# Altium schematic symbol library Library_Mecatronica.SchLib: 18 symbols
Pins are listed as number, name and electrical type; pins without a type are passive.

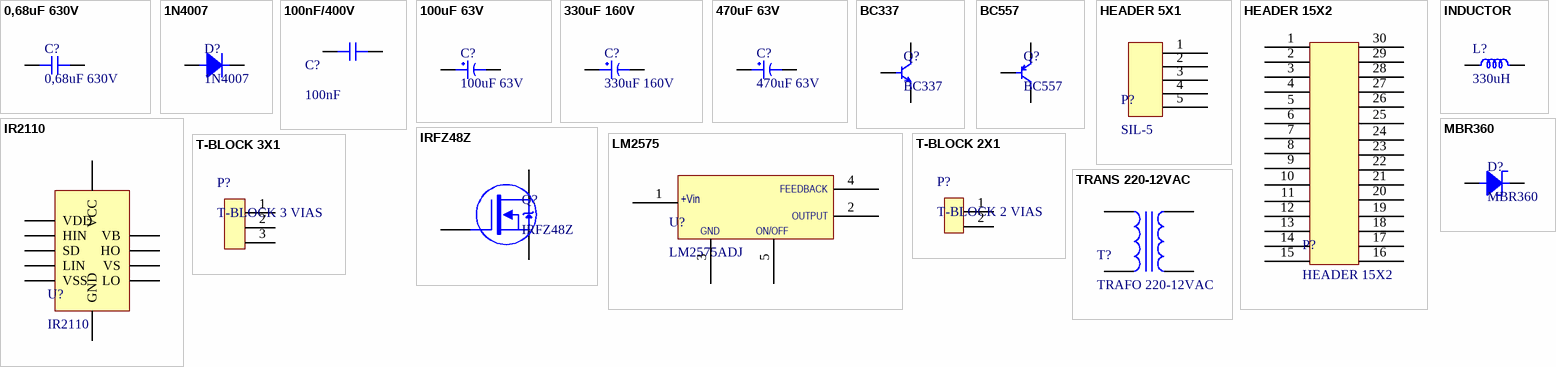
[diagram p0: symbols 0,68uF 630V to TRANS 220-12VAC]

## 0,68uF 630V
designator C?
POLYESTER CAPACITOR 0,68uF 630V
footprint 0,68uF 630V
pins: 1, 2

## 1N4007
designator D?
RECTIFIER DIODE 1A/700V
footprint 1N4007 (RECTIFIER DIODE 700V/1A)
pins: A, K

## 100nF/400V
designator C?, comment 100nF
POLYESTER CAPACITOR 100nF/400V
footprint CAPACITOR (GENERIC POLYESTER CAPACITOR)
pins: 1, 2

## 100uF 63V
designator C?
ELETROLYTICAL CAPACITOR 100uF 63V
footprint 100uF 63V
pins: 1, 2

## 330uF 160V
designator C?
ELETROLYTICAL CAPACITOR 330uF 160V
footprint 330uF 160V (ELETROLYTICAL CAPACITOR)
pins: 1, 2

## 470uF 63V
designator C?
ELETROLYTICAL CAPACITOR 470uF/63V
footprint 470uF 63V (ELETROLYTICAL CAPACITOR 470uF 63V)
pins: 1, 2

## BC337
designator Q?
TRANSISTOR NPN BC337 TO-92
footprint BC337 (TRANSISTOR NPN BC337)
pins: B, C, E

## BC557
designator Q?
TRANSISTOR PNP BC557 TO-92
footprint BC557 (PNP TRANSISTOR TO-92)
pins: B, C, E

## HEADER 5X1
designator P?, comment SIL-5
SINGLE IN LINE 5X1
footprint HEADER 5X1
pins: 1, 2, 3, 4, 5

## HEADER 15X2
designator P?
DUAL IN LINE CONNECTOR 15X2
footprint HEADER 30X2
pins: 1, 2, 3, 4, 5, 6, 7, 8, 9, 10, 11, 12, 13, 14, 15, 16, 17, 18, 19, 20, 21, 22, 23, 24, 25, 26, 27, 28, 29, 30

## INDUCTOR
designator L?, comment 330uH
INDUCTOR
footprint INDUCTOR
pins: 1, 2

## IR2110
designator U?
DIP 14 GATE DRIVER
footprint IR2110 (DIP-14)
pins: 1 LO, 2 GND, 3 VCC, 5 VS, 6 VB, 7 HO, 9 VDD, 10 HIN, 11 SD, 12 LIN, 13 VSS

## IRFZ48Z
designator Q?
MOSFET IRFZ48Z 55V/61A
footprint IRFZ48Z (IRFZ48Z 55V/11A)
pins: D, G, S

## LM2575
designator U?, comment LM2575ADJ
VOLTAGE REGULATOR LM2575ADJ
footprint LM2575
pins: 1, 2, 3, 4, 5
text: FEEDBACK; +Vin; OUTPUT; GND; ON/OFF

## MBR360
designator D?
SCHOTTKY BARRIER  RECTIFIER DIODE MBR360
footprint MBR350
pins: A, K

## T-BLOCK 2X1
designator P?, comment T-BLOCK 2 VIAS
TERMINAL BLOCK 2 VIAS
footprint T-BLOCK 2X1
pins: 1, 2

## T-BLOCK 3X1
designator P?, comment T-BLOCK 3 VIAS
TERMINAL BLOCK 2 VIAS
footprint T-BLOCK 3X1
pins: 1, 2, 3

## TRANS 220-12VAC
designator T?, comment TRAFO 220-12VAC
TRANSFORMADOR ISOLADOR 220VAC - 12VAC 1A
pins: 1, 2, 3, 4